# Altium footprint library WPME-FIRM.PcbLib: 2 footprints
Each footprint in its own frame and in the unit in brackets; x right, y up, seen from the top. Pads: shape width x height; smd on the part's side, far side on the other; paste and mask are expansions set on the pad; w line width, h text height; cw(c..) or ccw(c..) is an arc to the next point about the centre after c.
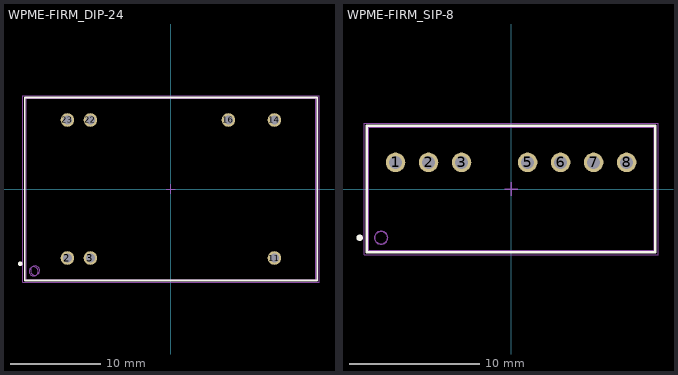
[diagram p0: the footprints below, top view; thin cyan lines are the x and y axes]

## WPME-FIRM_DIP-24 [mm]
height 10.8
pads (7):
  round 1.5 hole 1: 2(-11.43,-7.62) 3(-8.89,-7.62) 11(11.43,-7.62) 14(11.43,7.62) 16(6.35,7.62) 22(-8.89,7.62) 23(-11.43,7.62)
Top Overlay:
  circle w0.25: c-16.65,-8.25 r0.125
  lines w0.2: -16.15,-10.1 -16.15,10.1 16.15,10.1 16.15,-10.1 -16.15,-10.1
Top Assembly:
  circle w0.1: c-15.15,-9.1 r0.5
  lines w0.1: -16.15,-10.1 -16.15,10.1 16.15,10.1 16.15,-10.1 -16.15,-10.1
Top Designator:
  text ".Designator" at -3.647,-0.357 h1
Top 3D Body:
  circle w0.1: c-15,-9 r0.5
  lines w0.1: -16,-10 -16,10 16,10 16,-10 -16,-10
Top Courtyard:
  lines w0.05: -16.35,-10.3 -16.35,10.3 16.35,10.3 16.35,-10.3 -16.35,-10.3
Top Component Center:
  lines w0.1: -0.5,0 0.5,0 ; 0,-0.5 0,0.5
3D body "1750105311.stp": height 10.9, standoff -4, extent -16,-10 16,10

## WPME-FIRM_SIP-8 [mm]
height 12
pads (7):
  round 1.5 hole 1: 1(-8.89,2.05) 2(-6.35,2.05) 3(-3.81,2.05) 5(1.27,2.05) 6(3.81,2.05) 7(6.35,2.05) 8(8.89,2.05)
Top Overlay:
  circle w0.25: c-11.65,-3.75 r0.125
  lines w0.2: -11.1,-4.85 -11.1,4.85 11.1,4.85 11.1,-4.85 -11.1,-4.85
Top Assembly:
  circle w0.1: c-10,-3.75 r0.5
  lines w0.1: -11.1,-4.85 -11.1,4.85 11.1,4.85 11.1,-4.85 -11.1,-4.85
Top Designator:
  text ".Designator" at -3.647,-0.357 h1
Top 3D Body:
  circle w0.1: c-10,-3.75 r0.5
  lines w0.1: -11,-4.75 -11,4.75 11,4.75 11,-4.75 -11,-4.75
Top Courtyard:
  lines w0.05: -11.3,-5.05 -11.3,5.05 11.3,5.05 11.3,-5.05 -11.3,-5.05
Top Component Center:
  lines w0.1: -0.5,0 0.5,0 ; 0,-0.5 0,0.5
3D body "1770105311.stp": height 12.05, standoff -4.05, extent -11,-4.75 11,4.75